# Altium footprint library PCB_PTUController.PcbLib: 106 footprints (part 5 of 7)
Each footprint in its own frame and in the unit in brackets; x right, y up, seen from the top. Pads: shape width x height; smd on the part's side, far side on the other; paste and mask are expansions set on the pad; w line width, h text height; cw(c..) or ccw(c..) is an arc to the next point about the centre after c.
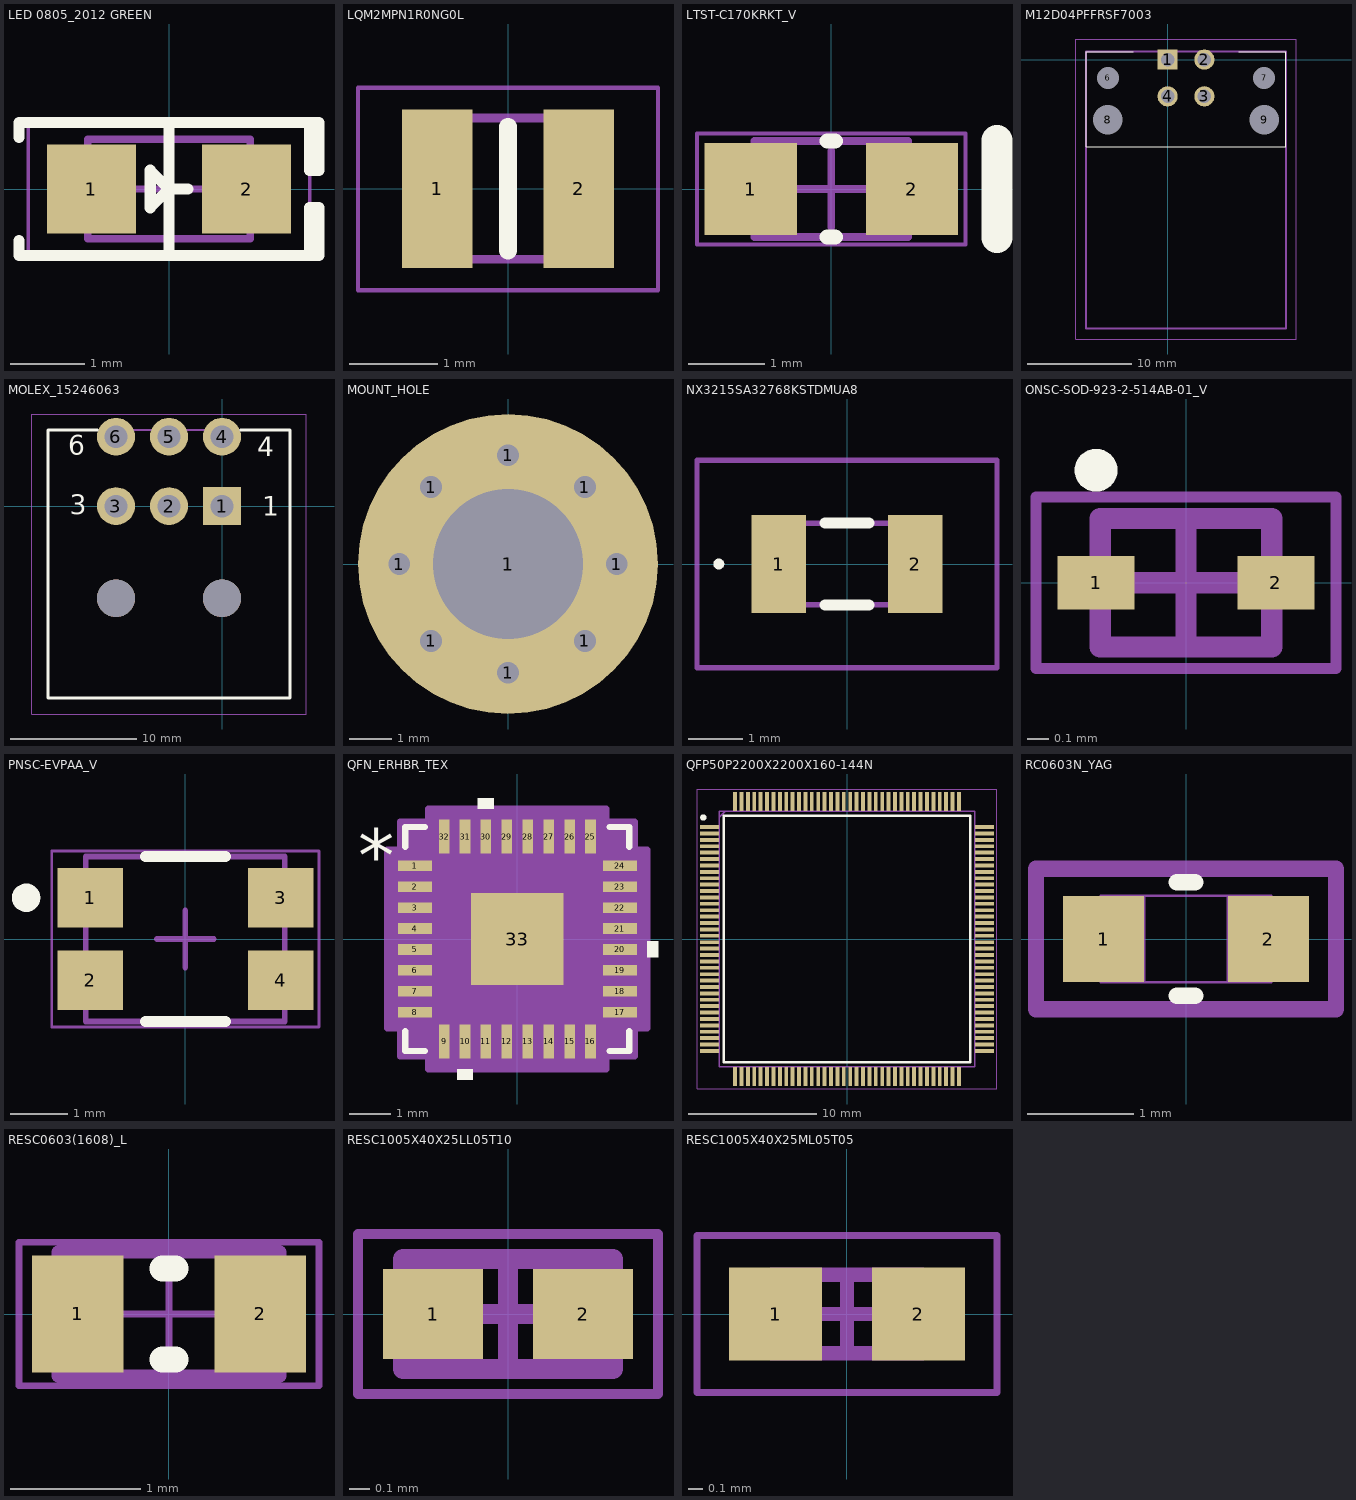
[diagram p4: the footprints below, top view; thin cyan lines are the x and y axes]

## LED 0805_2012 GREEN [mm] "Chip Diode, 2-Leads, Body 2.00x1.25mm, IPC Medium Density"
height 0.7
pads (2):
  rect 1.2x1.2 smd: 1(-1.05,0) 2(1.05,0)
Top Overlay:
  lines w0.15: -2.032,-0.7 -2.032,-0.9 1.905,-0.9 ; -2.032,0.7 -2.032,0.9 1.905,0.9 ; 0,-0.9 0,0.9 ; 0.254,0 0,0 ; 0,0 -0.254,0.254 -0.254,-0.254 0,0 ; 1.905,-0.9 1.905,-0.254 2.032,-0.254 2.032,-0.9 1.905,-0.9 ; 1.905,0.9 1.905,0.254 2.032,0.254 2.032,0.9 1.905,0.9
Top 3D Body:
  lines w0.1: -1.1,-0.675 1.1,-0.675 1.1,0.675 -1.1,0.675 -1.1,-0.675
Top Courtyard:
  lines w0.05: -1.905,-0.95 1.905,-0.95 1.905,0.95 -1.905,0.95 -1.905,-0.95
  lines w0.1: -0.5,0 0.5,0 ; 0,-0.5 0,0.5
3D body "LED 0805 Base GREEN.STEP": height 0.4, standoff 0, extent -1,-0.625 1,0.625
3D body "LED 0805 Lens GREEN.STEP": height 0.9, standoff 0.3, extent -0.65,-0.625 0.65,0.625

## LQM2MPN1R0NG0L [mm]
pads (2):
  rect 0.8x1.8 smd: 1(-0.8,0) 2(0.8,0)
Top Overlay:
  lines w0.2: 0,-0.7 0,0.7
Top 3D Body:
  lines w0.1: -1,-0.8 -1,0.8 1,0.8 1,-0.8 -1,-0.8
Top Courtyard:
  lines w0.05: -1.7,-1.15 -1.7,1.143 1.7,1.143 1.7,-1.15 -1.7,-1.15
3D body "LQM2MPN2R2MG0L.stp": height 0.9, standoff 0, extent -1,-0.8 1,0.8

## LTST-C170KRKT_V [mm] "SMD, 2-Leads, Body 2x1.25mm"
height 1.2
pads (2):
  rect 1.2x1.2 smd: 1(-1.05,0) 2(1.05,0)
Top Overlay:
  lines w0.2: -0.051,-0.625 0.051,-0.625 ; -0.051,0.625 0.051,0.625
  lines w0.4: 2.159,-0.635 2.159,0.635
Top 3D Body:
  lines w0.1: -0.7,-0.625 -0.7,0.625 ; 0.7,-0.625 0.7,0.625 ; -1,-0.625 1,-0.625 1,0.625 -1,0.625 -1,-0.625
Top Courtyard:
  lines w0.05: -1.75,-0.725 -1.75,0.725 1.75,0.725 1.75,-0.725 -1.75,-0.725
  lines w0.1: -0.5,0 0.5,0 ; 0,-0.5 0,0.5
3D body: height 1.2, standoff 0.5, extent -0.7,-0.625 0.7,0.625
3D body: height 0.5, standoff 0, extent -1,-0.625 1,0.625

## M12D04PFFRSF7003 [mm]
pads (8):
  rect 1.95x1.95 hole 1.3: 1(0,0)
  round 1.95 hole 1.3: 2(3.536,0) 3(3.536,-3.536) 4(0,-3.536)
  round 1.05 hole 2.1 unplated: 6(-5.732,-1.768) 7(9.268,-1.768)
  round 1.425 hole 2.85 unplated: 8(-5.732,-5.768) 9(9.268,-5.768)
Top Overlay:
  lines w0.1: -3.312,0.772 -7.832,0.772 -7.832,-8.382 11.368,-8.382 11.368,0.772 6.848,0.772
Top 3D Body:
  lines w0.2: -7.832,-25.828 11.368,-25.828 11.368,0.772 -7.832,0.772 -7.832,-25.828
Top Courtyard:
  lines w0.1: -8.832,-26.828 12.368,-26.828 12.368,1.975 -8.832,1.975 -8.832,-26.828
3D body "M12D-04PFFR-SF7003.stp": height 15.88, standoff -3.32, extent -7.874,-25.201 11.305,1.579

## MOLEX_15246063 [mm]
height 15
pads (8):
  rect 3x3 / inner round 3 / far side rect 3x3 hole 1.8: 1(0,0)
  round 3 hole 1.8: 2(-4.2,0) 3(-8.4,0) 4(0,5.5) 5(-4.2,5.5) 6(-8.4,5.5)
  round 3 hole 3 unplated mask+0.076: ""(-8.4,-7.3) ""(0,-7.3)
Top Overlay:
  lines w0.25: -9.876,6.03 -13.8,6.03 -13.8,-15.2 5.4,-15.2 5.4,6.03 1.476,6.03
  text "6" at -12.192,4.064 h1.52
  text "3" at -12.065,-0.635 h1.52
  text "4" at 2.794,3.937 h1.52
  text "1" at 3.175,-0.762 h1.52
Top 3D Body:
  lines w0.127: -13.8,-15.2 -13.8,6.03 5.4,6.03 5.4,-15.2 -13.8,-15.2
Top Courtyard:
  lines w0.05: -15.07,-16.47 -15.07,7.3 6.67,7.3 6.67,-16.47 -15.07,-16.47
3D body "15246063.stp": height 15, standoff -3.6, extent -13.866,-15.185 5.334,6.041

## MOUNT_HOLE [mil]
pads (9):
  round 20 hole 20: 1(-100,0) 1(-70.71,-70.71) 1(-70.71,70.71) 1(0,-100) 1(0,100) 1(70.71,-70.71) 1(70.71,70.71) 1(100,0)
  round 275.59 hole 137.8: 1(0,0)

## NX3215SA32768KSTDMUA8 [mm]
pads (2):
  rect 1x1.8 smd: 1(-1.25,0) 2(1.25,0)
Top Overlay:
  lines w0.1: -2.4,0 cw(c-2.35,0) -2.3,0 cw(c-2.35,0) -2.4,0
  lines w0.2: -0.4,-0.75 0.4,-0.75 ; -0.4,0.75 0.4,0.75
Top 3D Body:
  lines w0.1: -1.6,-0.75 -1.6,0.75 1.6,0.75 1.6,-0.75 -1.6,-0.75
Top Courtyard:
  lines w0.1: -2.75,-1.9 -2.75,1.9 2.75,1.9 2.75,-1.9 -2.75,-1.9
3D body "NX3215SA-32.768K-STD-MUA-8.stp": height 0.8, standoff 0, extent -1.6,-0.75 1.6,0.75

## ONSC-SOD-923-2-514AB-01_V [mm] "SOD, 2-Leads, Body 0.8x0.6mm"
height 0.4
pads (2):
  rect 0.36x0.25 smd: 1(-0.42,0) 2(0.42,0)
Top Overlay:
  circle w0.1: c-0.42,0.525 r0.05
Top 3D Body:
  lines w0.1: -0.4,-0.3 -0.4,0.3 0.4,0.3 0.4,-0.3 -0.4,-0.3
Top Courtyard:
  lines w0.05: -0.7,-0.4 -0.7,0.4 0.7,0.4 0.7,-0.4 -0.7,-0.4
  lines w0.1: -0.25,0 0.25,0 ; 0,-0.25 0,0.25
3D body: height 0.4, standoff 0, extent -0.4,-0.3 0.4,0.3

## PNSC-EVPAA_V [mm] "SMD, 4-Leads, Body 2.9x3.5mm, Pitch 1.45mm"
height 1.9
pads (4):
  rect 1.15x1.05 smd: 1(-1.675,0.725) 2(-1.675,-0.725) 3(1.675,0.725) 4(1.675,-0.725)
Top Overlay:
  circle w0.25: c-2.8,0.725 r0.125
  lines w0.2: -0.7,-1.45 0.7,-1.45 ; -0.7,1.45 0.7,1.45
Top 3D Body:
  lines w0.1: -1.75,-1.45 -1.75,1.45 1.75,1.45 1.75,-1.45 -1.75,-1.45
Top Courtyard:
  lines w0.05: -2.35,-1.55 2.35,-1.55 2.35,1.55 -2.35,1.55 -2.35,-1.55
  lines w0.1: -0.5,0 0.5,0 ; 0,-0.5 0,0.5
3D body: height 1.9, standoff 0, extent -1.749,-1.449 1.749,1.449

## Powerconnector [mm]
3D body "3D File RRAC3M-X-000.stp": height 25.7, standoff -0.3, extent -15.5,-31.2 15.5,7

## QFN_ERHBR_TEX [mil]
pads (33):
  rect 32x10 smd paste+0 mask+0: 1(-96.5,68.92) 2(-96.5,49.23) 3(-96.5,29.54) 4(-96.5,9.85) 5(-96.5,-9.85) 6(-96.5,-29.54) 7(-96.5,-49.23) 8(-96.5,-68.92) 17(96.5,-68.92) 18(96.5,-49.23) 19(96.5,-29.54) 20(96.5,-9.85) 21(96.5,9.85) 22(96.5,29.54) 23(96.5,49.23) 24(96.5,68.92)
  rect 10x32 smd paste+0 mask+0: 9(-68.92,-96.5) 10(-49.23,-96.5) 11(-29.54,-96.5) 12(-9.85,-96.5) 13(9.85,-96.5) 14(29.54,-96.5) 15(49.23,-96.5) 16(68.92,-96.5) 25(68.92,96.5) 26(49.23,96.5) 27(29.54,96.5) 28(9.85,96.5) 29(-9.85,96.5) 30(-29.54,96.5) 31(-49.23,96.5) 32(-68.92,96.5)
  rect 87x87 smd paste+0 mask+0: 33(0,0)
Top Overlay:
  region: -41.73,-122.5 -56.73,-122.5 -56.73,-132.5 -41.73,-132.5
  region: 122.5,-2.35 132.5,-2.35 132.5,-17.34 122.5,-17.34
  region: -22.04,122.5 -37.03,122.5 -37.03,132.5 -22.04,132.5
  lines w6: -105.5,-87.02 -105.5,-105.5 -87.02,-105.5 ; -105.5,87.02 -105.5,105.5 -87.02,105.5 ; 87.02,-105.5 105.5,-105.5 105.5,-87.02 ; 87.02,105.5 105.5,105.5 105.5,87.02
  text "*" at -150,53.76 h50
Top 3D Body:
  lines w1: -100.5,50.5 -50.5,100.5 ; -100.5,-100.5 100.5,-100.5 100.5,100.5 -100.5,100.5 -100.5,-100.5 ; -100.5,-74.92 -100.5,-62.91 -100.5,-74.92 ; -100.5,-55.23 -100.5,-43.23 -100.5,-55.23 ; -100.5,-35.53 -100.5,-23.54 -100.5,-35.53 ; -100.5,-15.85 -100.5,-3.85 -100.5,-15.85 ; -100.5,3.85 -100.5,15.85 -100.5,3.85 ; -100.5,23.54 -100.5,35.53 -100.5,23.54 ; -100.5,43.23 -100.5,55.23 -100.5,43.23 ; -100.5,62.91 -100.5,74.92 -100.5,62.91 ; -74.92,-100.5 -62.91,-100.5 -74.92,-100.5 ; -74.92,100.5 -62.91,100.5 -74.92,100.5 ; -55.23,-100.5 -43.23,-100.5 -55.23,-100.5 ; -55.23,100.5 -43.23,100.5 -55.23,100.5 ; -35.53,-100.5 -23.54,-100.5 -35.53,-100.5 ; -35.53,100.5 -23.54,100.5 -35.53,100.5 ; -15.85,-100.5 -3.85,-100.5 -15.85,-100.5 ; -15.85,100.5 -3.85,100.5 -15.85,100.5 ; 3.85,-100.5 15.85,-100.5 3.85,-100.5 ; 3.85,100.5 15.85,100.5 3.85,100.5 ; 23.54,-100.5 35.53,-100.5 23.54,-100.5 ; 23.54,100.5 35.53,100.5 23.54,100.5 ; 43.23,-100.5 55.23,-100.5 43.23,-100.5 ; 43.23,100.5 55.23,100.5 43.23,100.5 ; 62.91,-100.5 74.92,-100.5 62.91,-100.5 ; 62.91,100.5 74.92,100.5 62.91,100.5 ; 100.5,-74.92 100.5,-62.91 100.5,-74.92 ; 100.5,-55.23 100.5,-43.23 100.5,-55.23 ; 100.5,-35.53 100.5,-23.54 100.5,-35.53 ; 100.5,-15.85 100.5,-3.85 100.5,-15.85 ; 100.5,3.85 100.5,15.85 100.5,3.85 ; 100.5,23.54 100.5,35.53 100.5,23.54 ; 100.5,43.23 100.5,55.23 100.5,43.23 ; 100.5,62.91 100.5,74.92 100.5,62.91
  text "*" at -93,53.76 h50
Top Courtyard:
  region: -83.92,-110.5 -110.5,-110.5 -110.5,-83.92 -122.5,-83.92 -122.5,83.92 -110.5,83.92 -110.5,110.5 -83.92,110.5 -83.92,122.5 83.92,122.5 83.92,110.5 110.5,110.5 110.5,83.92 122.5,83.92 122.5,-83.92 110.5,-83.92 110.5,-110.5 83.92,-110.5 83.92,-122.5 -83.92,-122.5
  lines w6: -122.5,-83.92 -110.5,-83.92 -110.5,-110.5 -83.92,-110.5 -83.92,-122.5 83.92,-122.5 83.92,-110.5 110.5,-110.5 110.5,-83.92 122.5,-83.92 122.5,83.92 110.5,83.92 110.5,110.5 83.92,110.5 83.92,122.5 -83.92,122.5 -83.92,110.5 -110.5,110.5 -110.5,83.92 -122.5,83.92 -122.5,-83.92
3D body "QFN_ERHBR_TEX.step": height 39.09, standoff 0, extent -100.51,-100.51 100.51,100.51

## QFP50P2200X2200X160-144N [mm]
pads (144):
  rect 1.475x0.3 smd: 1(-10.738,8.75) 2(-10.738,8.25) 3(-10.738,7.75) 4(-10.738,7.25) 5(-10.738,6.75) 6(-10.738,6.25) 7(-10.738,5.75) 8(-10.738,5.25) 9(-10.738,4.75) 10(-10.738,4.25) 11(-10.738,3.75) 12(-10.738,3.25) 13(-10.738,2.75) 14(-10.738,2.25) 15(-10.738,1.75) 16(-10.738,1.25) 17(-10.738,0.75) 18(-10.738,0.25) 19(-10.738,-0.25) 20(-10.738,-0.75) 21(-10.738,-1.25) 22(-10.738,-1.75) 23(-10.738,-2.25) 24(-10.738,-2.75) 25(-10.738,-3.25) 26(-10.738,-3.75) 27(-10.738,-4.25) 28(-10.738,-4.75) 29(-10.738,-5.25) 30(-10.738,-5.75) 31(-10.738,-6.25) 32(-10.738,-6.75) 33(-10.738,-7.25) 34(-10.738,-7.75) 35(-10.738,-8.25) 36(-10.738,-8.75) 73(10.738,-8.75) 74(10.738,-8.25) 75(10.738,-7.75) 76(10.738,-7.25) 77(10.738,-6.75) 78(10.738,-6.25) 79(10.738,-5.75) 80(10.738,-5.25) 81(10.738,-4.75) 82(10.738,-4.25) 83(10.738,-3.75) 84(10.738,-3.25) 85(10.738,-2.75) 86(10.738,-2.25) 87(10.738,-1.75) 88(10.738,-1.25) 89(10.738,-0.75) 90(10.738,-0.25) 91(10.738,0.25) 92(10.738,0.75) 93(10.738,1.25) 94(10.738,1.75) 95(10.738,2.25) 96(10.738,2.75) 97(10.738,3.25) 98(10.738,3.75) 99(10.738,4.25) 100(10.738,4.75) 101(10.738,5.25) 102(10.738,5.75) 103(10.738,6.25) 104(10.738,6.75) 105(10.738,7.25) 106(10.738,7.75) 107(10.738,8.25) 108(10.738,8.75)
  rect 0.3x1.475 smd: 37(-8.75,-10.738) 38(-8.25,-10.738) 39(-7.75,-10.738) 40(-7.25,-10.738) 41(-6.75,-10.738) 42(-6.25,-10.738) 43(-5.75,-10.738) 44(-5.25,-10.738) 45(-4.75,-10.738) 46(-4.25,-10.738) 47(-3.75,-10.738) 48(-3.25,-10.738) 49(-2.75,-10.738) 50(-2.25,-10.738) 51(-1.75,-10.738) 52(-1.25,-10.738) 53(-0.75,-10.738) 54(-0.25,-10.738) 55(0.25,-10.738) 56(0.75,-10.738) 57(1.25,-10.738) 58(1.75,-10.738) 59(2.25,-10.738) 60(2.75,-10.738) 61(3.25,-10.738) 62(3.75,-10.738) 63(4.25,-10.738) 64(4.75,-10.738) 65(5.25,-10.738) 66(5.75,-10.738) 67(6.25,-10.738) 68(6.75,-10.738) 69(7.25,-10.738) 70(7.75,-10.738) 71(8.25,-10.738) 72(8.75,-10.738) 109(8.75,10.738) 110(8.25,10.738) 111(7.75,10.738) 112(7.25,10.738) 113(6.75,10.738) 114(6.25,10.738) 115(5.75,10.738) 116(5.25,10.738) 117(4.75,10.738) 118(4.25,10.738) 119(3.75,10.738) 120(3.25,10.738) 121(2.75,10.738) 122(2.25,10.738) 123(1.75,10.738) 124(1.25,10.738) 125(0.75,10.738) 126(0.25,10.738) 127(-0.25,10.738) 128(-0.75,10.738) 129(-1.25,10.738) 130(-1.75,10.738) 131(-2.25,10.738) 132(-2.75,10.738) 133(-3.25,10.738) 134(-3.75,10.738) 135(-4.25,10.738) 136(-4.75,10.738) 137(-5.25,10.738) 138(-5.75,10.738) 139(-6.25,10.738) 140(-6.75,10.738) 141(-7.25,10.738) 142(-7.75,10.738) 143(-8.25,10.738) 144(-8.75,10.738)
Top Overlay:
  circle w0.25: c-11.225,9.5 r0.125
  lines w0.2: -9.65,-9.65 -9.65,9.65 9.65,9.65 9.65,-9.65 -9.65,-9.65
Top 3D Body:
  lines w0.1: -10,9.5 -9.5,10 ; -10,-10 -10,10 10,10 10,-10 -10,-10
Top Courtyard:
  lines w0.05: -11.725,-11.725 -11.725,11.725 11.725,11.725 11.725,-11.725 -11.725,-11.725
3D body "STM32H755ZIT6U.stp": height 1.6, standoff 0, extent -11,-11 11,11

## RC0603N_YAG [mil]
pads (2):
  rect 30x32 smd paste+0 mask+0: 1(-30.5,0) 2(30.5,0)
Top Overlay:
  lines w6: -3.39,-21 3.39,-21 ; -3.39,21 3.39,21
Top 3D Body:
  lines w1: -31.5,-16 -31.5,16 ; -31.5,-16 -15.5,-16 -15.5,16 -31.5,16 ; -31.5,-16 31.5,-16 ; -31.5,-16 -31.5,16 ; -31.5,16 31.5,16 ; 31.5,-16 15.5,-16 15.5,16 31.5,16 ; 31.5,-16 31.5,16 ; 31.5,-16 31.5,16
Top Courtyard:
  lines w6: -55.5,-26 -55.5,26 55.5,26 55.5,-26 -55.5,-26
3D body "RC0603N_YAG.step": height 27.99, standoff 0, extent -31.5,-15.98 31.5,15.98

## RESC0603(1608)_L [mm] "Chip Resistor, Body 1.6x0.8mm, IPC High Density"
height 0.6
pads (2):
  rect 0.7x0.9 smd: 1(-0.7,0) 2(0.7,0)
Top Overlay:
  lines w0.2: -0.05,-0.35 0.05,-0.35 ; -0.05,0.35 0.05,0.35
Top 3D Body:
  lines w0.1: -0.85,-0.475 0.85,-0.475 0.85,0.475 -0.85,0.475 -0.85,-0.475
Top Courtyard:
  lines w0.05: -0.475,0 0.475,0 ; 0,-0.475 0,0.475 ; -1.15,-0.55 1.15,-0.55 1.15,0.55 -1.15,0.55 -1.15,-0.55
3D body: height 0.6, standoff 0, extent -0.849,-0.474 -0.58,0.475
3D body: height 0.6, standoff 0, extent -0.58,-0.474 0.581,0.475
3D body: height 0.6, standoff 0, extent 0.581,-0.474 0.85,0.475

## RESC1005X40X25LL05T10 [mm] "Chip Resistor, 2-Leads, Body 1.00x0.50mm, IPC High Density"
height 0.4
pads (2):
  rect 0.5x0.45 smd: 1(-0.375,0) 2(0.375,0)
Top 3D Body:
  lines w0.1: -0.525,-0.275 0.525,-0.275 0.525,0.275 -0.525,0.275 -0.525,-0.275
Top Courtyard:
  lines w0.05: -0.75,-0.4 0.75,-0.4 0.75,0.4 -0.75,0.4 -0.75,-0.4
  lines w0.1: -0.275,0 0.275,0 ; 0,-0.275 0,0.275
3D body: height 0.4, standoff 0, extent 0.275,-0.275 0.525,0.275
3D body: height 0.4, standoff 0, extent -0.525,-0.275 -0.275,0.275
3D body: height 0.4, standoff 0, extent -0.275,-0.275 0.275,0.275

## RESC1005X40X25ML05T05 [mm] "Chip Resistor, 2-Leads, Body 1.00x0.50mm, IPC Low Density"
height 0.4
pads (2):
  rect 0.65x0.65 smd: 1(-0.5,0) 2(0.5,0)
Top 3D Body:
  lines w0.1: -0.525,-0.275 0.525,-0.275 0.525,0.275 -0.525,0.275 -0.525,-0.275
Top Courtyard:
  lines w0.05: -1.05,-0.55 1.05,-0.55 1.05,0.55 -1.05,0.55 -1.05,-0.55
  lines w0.1: -0.275,0 0.275,0 ; 0,-0.275 0,0.275
3D body: height 0.4, standoff 0, extent 0.275,-0.275 0.525,0.275
3D body: height 0.4, standoff 0, extent -0.525,-0.275 -0.275,0.275
3D body: height 0.4, standoff 0, extent -0.275,-0.275 0.275,0.275